# Altium schematic symbol library IRLML6402TRPBF.SchLib: 1 symbol
Pins are listed as number, name and electrical type; pins without a type are passive.

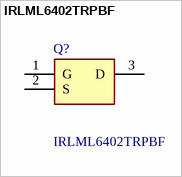
[diagram p0: symbol IRLML6402TRPBF]

## IRLML6402TRPBF
designator Q?
MOSFET MOSFT P-Ch -3.7A 65mOhm 8nC Log Lvl; Manufacturer_Name: Infineon; Geometry.Height: 1.12mm; Manufacturer_Part_Number: IRLML6402TRPBF; Mouser Part Number: 942-IRLML6402TRPBF; Mouser Price/Stock: https://www.mouser.co.uk/ProductDetail/Infineon-Technologies/IRLML6402TRPBF?qs=9%252BKlkBgLFf0HuZuONx2Ewg%3D%3D; Arrow Part Number: IRLML6402TRPBF; Arrow Price/Stock: https://www.arrow.com/en/products/irlml6402trpbf/infineon-technologies-ag?utm_currency=USD&region=nac; Datasheet Link: http://www.infineon.com/dgdl/irlml6402pbf.pdf?fileId=5546d462533600a401535668d5c2263c
footprint SOT95P237X112-3N
pins: 1 G, 2 S, 3 D